# Altium footprint library Connector.PcbLib: 272 footprints (part 16 of 17)
Each footprint in its own frame and in the unit in brackets; x right, y up, seen from the top. Pads: shape width x height; smd on the part's side, far side on the other; paste and mask are expansions set on the pad; w line width, h text height; cw(c..) or ccw(c..) is an arc to the next point about the centre after c.
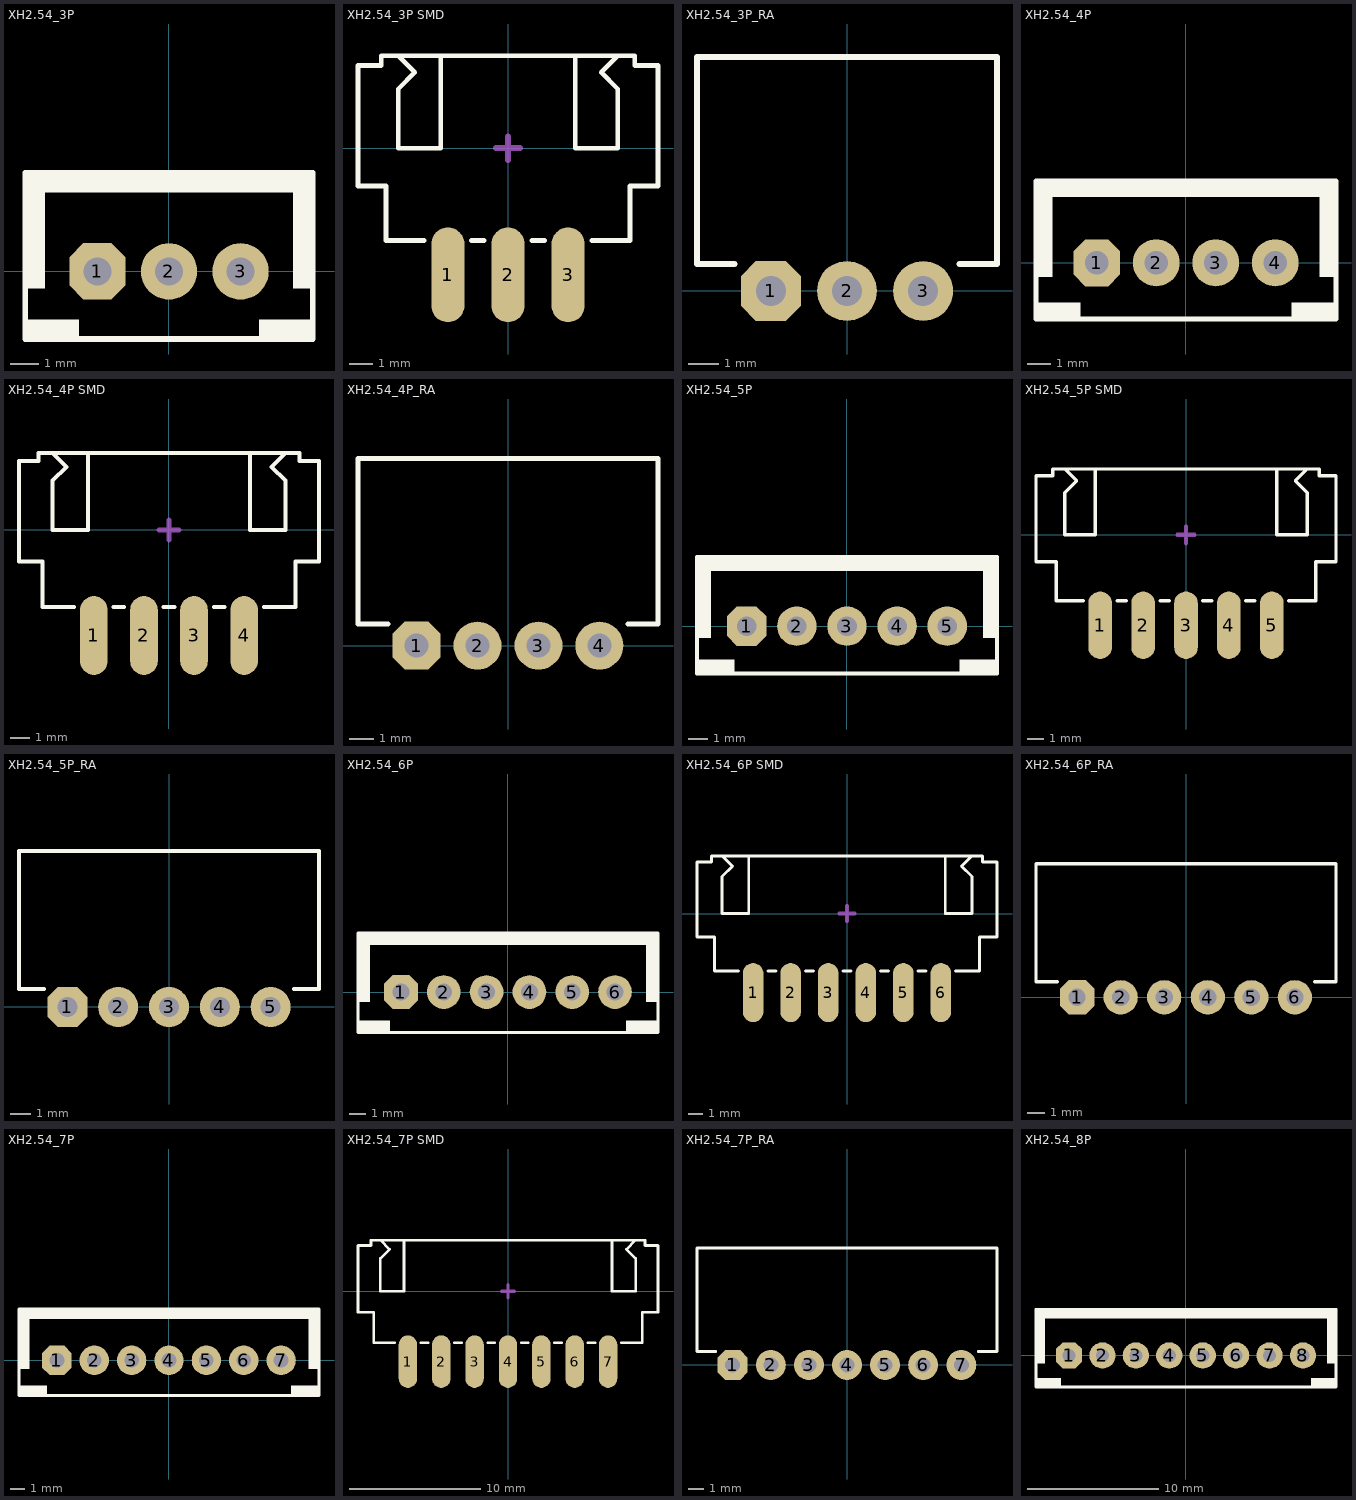
[diagram p15: the footprints below, top view; thin cyan lines are the x and y axes]

## XH2.54_3P [mm] "PW10-xx-M, JST-BxB-XH-A pitch: 2.5mm"
pads (3):
  oct 2x2 hole 1: 1(-2.54,0)
  round 2 hole 1: 2(0,0) 3(2.54,0)
Top Overlay:
  rectangle: -5.1,-2.4 -3.2,-1.7
  rectangle: -5.1,-0.6 -4.4,3.5
  region: -5.1,3.5 -5.1,2.8 5.1,2.8 5.1,3.5
  region: 5.1,3.5 4.4,3.5 4.4,-0.6 5.1,-0.6
  region: 5.1,-1.7 3.2,-1.7 3.2,-2.4 5.1,-2.4
  lines w0.2: -5.1,-2.4 5.1,-2.4 5.1,3.5 -5.1,3.5 -5.1,-2.4
Top Designator:
  text ".Designator" at -3.71,0.206 h1.52
3D body "JST - XH - Thru (V) - 3Pin - 2.54mm.stp": height 7.21, standoff -3, extent -4.877,-2.471 4.877,3.371

## XH2.54_3P SMD [mm] "XH2.54 SMD 2.54 mm"
pads (3):
  oval 1.4x4 smd: 1(-2.54,-5.35) 2(0,-5.35) 3(2.54,-5.35)
Top Overlay:
  lines w0.2: -4.637,3.9 -3.937,3.2 -4.637,2.5 -4.637,0 -2.837,0 -2.837,3.9 ; -3.54,-3.9 -5.15,-3.9 -5.15,-1.6 -6.337,-1.6 -6.337,3.488 -5.352,3.488 -5.352,3.9 5.352,3.9 5.352,3.488 6.337,3.488 6.337,-1.6 5.15,-1.6 5.15,-3.9 3.54,-3.9 ; -1.54,-3.9 -1,-3.9 ; 1,-3.9 1.54,-3.9 ; 2.837,3.9 2.837,0 4.637,0 4.637,2.5 3.937,3.2 4.637,3.9
Top Designator:
  lines w0.254: -0.5,0 0.5,0 ; 0,-0.5 0,0.5
  text ".Designator" at -3.71,1.156 h1.52
3D body "JST - XH - SMD (R) - 3Pin - 2.54mm.stp": height 5.92, standoff 0, extent -6.337,-5.953 6.337,3.953

## XH2.54_3P_RA [mm]
pads (3):
  oct 2x2 hole 1: 1(-2.54,0)
  round 2 hole 1: 2(0,0) 3(2.54,0)
Top Overlay:
  lines w0.2: -3.75,0.9 -5,0.9 -5,7.8 5,7.8 5,0.9 3.75,0.9
Top Designator:
  text ".Designator" at -3.71,3.055 h1.52
3D body "JST - XH - Thru (R) - 3Pin - 2.54mm.stp": height 5.84, standoff -3.38, extent -4.877,-0.336 4.877,7.7

## XH2.54_4P [mm] "PW10-xx-M, JST-BxB-XH-A pitch: 2.5mm"
pads (4):
  oct 2x2 hole 1: 1(-3.81,0)
  round 2 hole 1: 2(-1.27,0) 3(1.27,0) 4(3.81,0)
Top Overlay:
  region: 6.4,-1.7 4.5,-1.7 4.5,-2.4 6.4,-2.4
  region: 6.4,3.5 5.7,3.5 5.7,-0.6 6.4,-0.6
  region: -6.4,3.5 -6.4,2.8 6.4,2.8 6.4,3.5
  rectangle: -6.4,-0.6 -5.7,3.5
  rectangle: -6.4,-2.4 -4.5,-1.7
  lines w0.2: -6.4,-2.4 -6.4,3.5 6.4,3.5 6.4,-2.4 -6.4,-2.4
Top Designator:
  text ".Designator" at -3.71,0.206 h1.52
3D body "JST - XH - Thru (V) - 4Pin - 2.54mm.stp": height 7.21, standoff -3, extent -6.147,-2.471 6.147,3.371

## XH2.54_4P SMD [mm] "XH2.54 SMD 2.54 mm"
pads (4):
  oval 1.4x4 smd: 1(-3.81,-5.35) 2(-1.27,-5.35) 3(1.27,-5.35) 4(3.81,-5.35)
Top Overlay:
  lines w0.2: -5.907,3.9 -5.207,3.2 -5.907,2.5 -5.907,0 -4.107,0 -4.107,3.9 ; -4.81,-3.9 -6.42,-3.9 -6.42,-1.6 -7.607,-1.6 -7.607,3.488 -6.622,3.488 -6.622,3.9 6.622,3.9 6.622,3.488 7.607,3.488 7.607,-1.6 6.42,-1.6 6.42,-3.9 4.81,-3.9 ; -2.81,-3.9 -2.27,-3.9 ; -0.27,-3.9 0.27,-3.9 ; 2.27,-3.9 2.81,-3.9 ; 4.107,3.9 4.107,0 5.907,0 5.907,2.5 5.207,3.2 5.907,3.9
Top Designator:
  lines w0.254: -0.5,0 0.5,0 ; 0,-0.5 0,0.5
  text ".Designator" at -3.71,1.156 h1.52
3D body "JST - XH - SMD (R) - 4Pin - 2.54mm.stp": height 5.92, standoff 0, extent -7.607,-5.953 7.607,3.953

## XH2.54_4P_RA [mm]
pads (4):
  oct 2x2 hole 1: 1(-3.81,0)
  round 2 hole 1: 2(-1.27,0) 3(1.27,0) 4(3.81,0)
Top Overlay:
  lines w0.2: -5,0.9 -6.25,0.9 -6.25,7.8 6.25,7.8 6.25,0.9 5,0.9
Top Designator:
  text ".Designator" at -3.71,3.055 h1.52
3D body "JST - XH - Thru (R) - 4Pin - 2.54mm.stp": height 5.84, standoff -3.38, extent -6.147,-0.336 6.147,7.7

## XH2.54_5P [mm] "PW10-xx-M, JST-BxB-XH-A pitch: 2.5mm"
pads (5):
  oct 2x2 hole 1: 1(-5.08,0)
  round 2 hole 1: 2(-2.54,0) 3(0,0) 4(2.54,0) 5(5.08,0)
Top Overlay:
  region: 7.6,-1.7 5.7,-1.7 5.7,-2.4 7.6,-2.4
  region: 7.6,3.5 6.9,3.5 6.9,-0.6 7.6,-0.6
  region: -7.6,3.5 -7.6,2.8 7.6,2.8 7.6,3.5
  rectangle: -7.6,-0.6 -6.9,3.5
  rectangle: -7.6,-2.4 -5.7,-1.7
  lines w0.2: -7.6,-2.4 -7.6,3.5 7.6,3.5 7.6,-2.4 -7.6,-2.4
Top Designator:
  text ".Designator" at -3.71,0.206 h1.52
3D body "JST - XH - Thru (V) - 5Pin - 2.54mm.stp": height 7.21, standoff -3, extent -7.417,-2.471 7.417,3.371

## XH2.54_5P SMD [mm] "XH2.54 SMD 2.54 mm"
pads (5):
  oval 1.4x4 smd: 1(-5.08,-5.35) 2(-2.54,-5.35) 3(0,-5.35) 4(2.54,-5.35) 5(5.08,-5.35)
Top Overlay:
  lines w0.2: -7.177,3.9 -6.477,3.2 -7.177,2.5 -7.177,0 -5.377,0 -5.377,3.9 ; -6.08,-3.9 -7.69,-3.9 -7.69,-1.6 -8.877,-1.6 -8.877,3.488 -7.892,3.488 -7.892,3.9 7.892,3.9 7.892,3.488 8.877,3.488 8.877,-1.6 7.69,-1.6 7.69,-3.9 6.08,-3.9 ; -4.08,-3.9 -3.54,-3.9 ; -1.54,-3.9 -1,-3.9 ; 1,-3.9 1.54,-3.9 ; 3.54,-3.9 4.08,-3.9 ; 5.377,3.9 5.377,0 7.177,0 7.177,2.5 6.477,3.2 7.177,3.9
Top Designator:
  lines w0.254: -0.5,0 0.5,0 ; 0,-0.5 0,0.5
  text ".Designator" at -3.71,1.156 h1.52
3D body "JST - XH - SMD (R) - 5Pin - 2.54mm.stp": height 5.92, standoff 0, extent -8.877,-5.953 8.877,3.953

## XH2.54_5P_RA [mm]
pads (5):
  oct 2x2 hole 1: 1(-5.08,0)
  round 2 hole 1: 2(-2.54,0) 3(0,0) 4(2.54,0) 5(5.08,0)
Top Overlay:
  lines w0.2: -6.25,0.9 -7.5,0.9 -7.5,7.8 7.5,7.8 7.5,0.9 6.25,0.9
Top Designator:
  text ".Designator" at -3.71,3.055 h1.52
3D body "JST - XH - Thru (R) - 5Pin - 2.54mm.stp": height 5.84, standoff -3.38, extent -7.417,-0.336 7.417,7.7

## XH2.54_6P [mm] "PW10-xx-M, JST-BxB-XH-A pitch: 2.5mm"
pads (6):
  oct 2x2 hole 1: 1(-6.35,0)
  round 2 hole 1: 2(-3.81,0) 3(-1.27,0) 4(1.27,0) 5(3.81,0) 6(6.35,0)
Top Overlay:
  region: 8.9,-1.7 7,-1.7 7,-2.4 8.9,-2.4
  region: 8.9,3.5 8.2,3.5 8.2,-0.6 8.9,-0.6
  region: -8.9,3.5 -8.9,2.8 8.9,2.8 8.9,3.5
  rectangle: -8.9,-0.6 -8.2,3.5
  rectangle: -8.9,-2.4 -7,-1.7
  lines w0.2: -8.9,-2.4 -8.9,3.5 8.9,3.5 8.9,-2.4 -8.9,-2.4
Top Designator:
  text ".Designator" at -3.71,0.206 h1.52
3D body "JST - XH - Thru (V) - 6Pin - 2.54mm.stp": height 7.21, standoff -3, extent -8.687,-2.471 8.687,3.371

## XH2.54_6P SMD [mm] "XH2.54 SMD 2.54 mm"
pads (6):
  oval 1.4x4 smd: 1(-6.35,-5.35) 2(-3.81,-5.35) 3(-1.27,-5.35) 4(1.27,-5.35) 5(3.81,-5.35) 6(6.35,-5.35)
Top Overlay:
  lines w0.2: -8.447,3.9 -7.747,3.2 -8.447,2.5 -8.447,0 -6.647,0 -6.647,3.9 ; -7.35,-3.9 -8.96,-3.9 -8.96,-1.6 -10.147,-1.6 -10.147,3.488 -9.162,3.488 -9.162,3.9 9.162,3.9 9.162,3.488 10.147,3.488 10.147,-1.6 8.96,-1.6 8.96,-3.9 7.35,-3.9 ; -5.35,-3.9 -4.81,-3.9 ; -2.81,-3.9 -2.27,-3.9 ; -0.27,-3.9 0.27,-3.9 ; 2.27,-3.9 2.81,-3.9 ; 4.81,-3.9 5.35,-3.9 ; 6.647,3.9 6.647,0 8.447,0 8.447,2.5 7.747,3.2 8.447,3.9
Top Designator:
  lines w0.254: -0.5,0 0.5,0 ; 0,-0.5 0,0.5
  text ".Designator" at -3.71,1.156 h1.52
3D body "JST - XH - SMD (R) - 6Pin - 2.54mm.stp": height 5.92, standoff 0, extent -10.147,-5.953 10.147,3.953

## XH2.54_6P_RA [mm]
pads (6):
  oct 2x2 hole 1: 1(-6.35,0)
  round 2 hole 1: 2(-3.81,0) 3(-1.27,0) 4(1.27,0) 5(3.81,0) 6(6.35,0)
Top Overlay:
  lines w0.2: -7.5,0.9 -8.75,0.9 -8.75,7.8 8.75,7.8 8.75,0.9 7.5,0.9
Top Designator:
  text ".Designator" at -3.71,3.055 h1.52
3D body "JST - XH - Thru (R) - 6Pin - 2.54mm.stp": height 5.84, standoff -3.38, extent -8.687,-0.336 8.687,7.7

## XH2.54_7P [mm] "PW10-xx-M, JST-BxB-XH-A pitch: 2.5mm"
pads (7):
  oct 2x2 hole 1: 1(-7.62,0)
  round 2 hole 1: 2(-5.08,0) 3(-2.54,0) 4(0,0) 5(2.54,0) 6(5.08,0) 7(7.62,0)
Top Overlay:
  region: 10.2,-1.7 8.3,-1.7 8.3,-2.4 10.2,-2.4
  region: 10.2,3.5 9.5,3.5 9.5,-0.6 10.2,-0.6
  region: -10.2,3.5 -10.2,2.8 10.2,2.8 10.2,3.5
  rectangle: -10.2,-0.6 -9.5,3.5
  rectangle: -10.2,-2.4 -8.3,-1.7
  lines w0.2: -10.2,-2.4 -10.2,3.5 10.2,3.5 10.2,-2.4 -10.2,-2.4
Top Designator:
  text ".Designator" at -3.71,0.206 h1.52
3D body "JST - XH - Thru (V) - 7Pin - 2.54mm.stp": height 7.21, standoff -3, extent -9.957,-2.471 9.957,3.371

## XH2.54_7P SMD [mm] "XH2.54 SMD 2.54 mm"
pads (7):
  oval 1.4x4 smd: 1(-7.62,-5.35) 2(-5.08,-5.35) 3(-2.54,-5.35) 4(0,-5.35) 5(2.54,-5.35) 6(5.08,-5.35) 7(7.62,-5.35)
Top Overlay:
  lines w0.2: -9.717,3.9 -9.017,3.2 -9.717,2.5 -9.717,0 -7.917,0 -7.917,3.9 ; -8.62,-3.9 -10.23,-3.9 -10.23,-1.6 -11.417,-1.6 -11.417,3.488 -10.432,3.488 -10.432,3.9 10.432,3.9 10.432,3.488 11.417,3.488 11.417,-1.6 10.23,-1.6 10.23,-3.9 8.62,-3.9 ; -6.62,-3.9 -6.08,-3.9 ; -4.08,-3.9 -3.54,-3.9 ; -1.54,-3.9 -1,-3.9 ; 1,-3.9 1.54,-3.9 ; 3.54,-3.9 4.08,-3.9 ; 6.08,-3.9 6.62,-3.9 ; 7.917,3.9 7.917,0 9.717,0 9.717,2.5 9.017,3.2 9.717,3.9
Top Designator:
  lines w0.254: -0.5,0 0.5,0 ; 0,-0.5 0,0.5
  text ".Designator" at -3.71,1.156 h1.52
3D body "JST - XH - SMD (R) - 7Pin - 2.54mm.stp": height 5.92, standoff 0, extent -11.417,-5.953 11.417,3.953

## XH2.54_7P_RA [mm]
pads (7):
  oct 2x2 hole 1: 1(-7.62,0)
  round 2 hole 1: 2(-5.08,0) 3(-2.54,0) 4(0,0) 5(2.54,0) 6(5.08,0) 7(7.62,0)
Top Overlay:
  lines w0.2: -8.75,0.9 -10,0.9 -10,7.8 10,7.8 10,0.9 8.75,0.9
Top Designator:
  text ".Designator" at -3.71,3.055 h1.52
3D body "JST - XH - Thru (R) - 7Pin - 2.54mm.stp": height 5.84, standoff -3.38, extent -9.957,-0.336 9.957,7.7

## XH2.54_8P [mm] "PW10-xx-M, JST-BxB-XH-A pitch: 2.5mm"
pads (8):
  oct 2x2 hole 1: 1(-8.89,0)
  round 2 hole 1: 2(-6.35,0) 3(-3.81,0) 4(-1.27,0) 5(1.27,0) 6(3.81,0) 7(6.35,0) 8(8.89,0)
Top Overlay:
  rectangle: -11.4,-2.4 -9.5,-1.7
  rectangle: -11.4,-0.6 -10.7,3.5
  region: -11.4,3.5 -11.4,2.8 11.4,2.8 11.4,3.5
  region: 11.4,3.5 10.7,3.5 10.7,-0.6 11.4,-0.6
  region: 11.4,-1.7 9.5,-1.7 9.5,-2.4 11.4,-2.4
  lines w0.2: -11.4,-2.4 11.4,-2.4 11.4,3.5 -11.4,3.5 -11.4,-2.4
Top Designator:
  text ".Designator" at -3.71,0.206 h1.52
3D body "JST - XH - Thru (V) - 8Pin - 2.54mm.stp": height 7.21, standoff -3, extent -11.227,-2.471 11.227,3.371